# EAGLE library part FH34SRJ-50S-0.5SH(50) (library card_samac_3d)
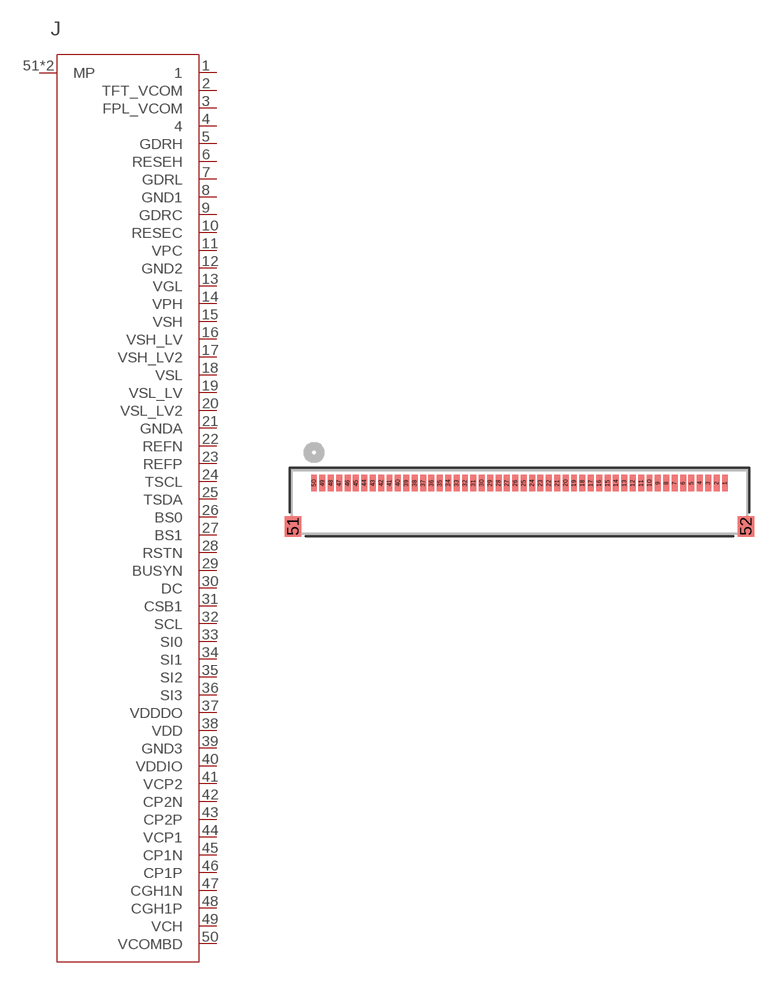
[diagram p1: symbol with the pads of CONN50X1_FH34SRJ-50S-0.5SH(50); footprint CONN50X1_FH34SRJ-50S-0.5SH(50)]

Designator prefix J

## FH34SRJ-50S-0.5SH(50)CONN50X1_FH34SRJ-50S-0.5SH(50)  [CONN50X1_FH34SRJ-50S-0.5SH(50)]
1  1  pas
2  TFT_VCOM  pas
3  FPL_VCOM  pas
4  4  pas
5  GDRH  pas
6  RESEH  pas
7  GDRL  pas
8  GND1  pas
9  GDRC  pas
10  RESEC  pas
11  VPC  pas
12  GND2  pas
13  VGL  pas
14  VPH  pas
15  VSH  pas
16  VSH_LV  pas
17  VSH_LV2  pas
18  VSL  pas
19  VSL_LV  pas
20  VSL_LV2  pas
21  GNDA  pas
22  REFN  pas
23  REFP  pas
24  TSCL  pas
25  TSDA  pas
26  BS0  pas
27  BS1  pas
28  RSTN  pas
29  BUSYN  pas
30  DC  pas
31  CSB1  pas
32  SCL  pas
33  SI0  pas
34  SI1  pas
35  SI2  pas
36  SI3  pas
37  VDDDO  pas
38  VDD  pas
39  GND3  pas
40  VDDIO  pas
41  VCP2  pas
42  CP2N  pas
43  CP2P  pas
44  VCP1  pas
45  CP1N  pas
46  CP1P  pas
47  CGH1N  pas
48  CGH1P  pas
49  VCH  pas
50  VCOMBD  pas
51  MP  pas
52  MP  pas

## Footprint CONN50X1_FH34SRJ-50S-0.5SH(50) (pad centres in mm)
smd 0.356 x 1: 1 12.25,1.13; 2 11.75,1.13; 3 11.25,1.13; 4 10.75,1.13; 5 10.25,1.13; 6 9.75,1.13; 7 9.25,1.13; 8 8.75,1.13; 9 8.25,1.13; 10 7.75,1.13; 11 7.25,1.13; 12 6.75,1.13; 13 6.25,1.13; 14 5.75,1.13; 15 5.25,1.13; 16 4.75,1.13; 17 4.25,1.13; 18 3.75,1.13; 19 3.25,1.13; 20 2.75,1.13; 21 2.25,1.13; 22 1.75,1.13; 23 1.25,1.13; 24 0.75,1.13; 25 0.25,1.13; 26 -0.25,1.13; 27 -0.75,1.13; 28 -1.25,1.13; 29 -1.75,1.13; 30 -2.25,1.13; 31 -2.75,1.13; 32 -3.25,1.13; 33 -3.75,1.13; 34 -4.25,1.13; 35 -4.75,1.13; 36 -5.25,1.13; 37 -5.75,1.13; 38 -6.25,1.13; 39 -6.75,1.13; 40 -7.25,1.13; 41 -7.75,1.13; 42 -8.25,1.13; 43 -8.75,1.13; 44 -9.25,1.13; 45 -9.75,1.13; 46 -10.25,1.13; 47 -10.75,1.13; 48 -11.25,1.13; 49 -11.75,1.13; 50 -12.25,1.13
smd 1 x 1.2: 51 -13.5,-1.455; 52 13.5,-1.455